# Altium footprint library Footprint-Lib-PhilsLab.PcbLib: 351 footprints (part 12 of 22)
Each footprint in its own frame and in the unit in brackets; x right, y up, seen from the top. Pads: shape width x height; smd on the part's side, far side on the other; paste and mask are expansions set on the pad; w line width, h text height; cw(c..) or ccw(c..) is an arc to the next point about the centre after c.
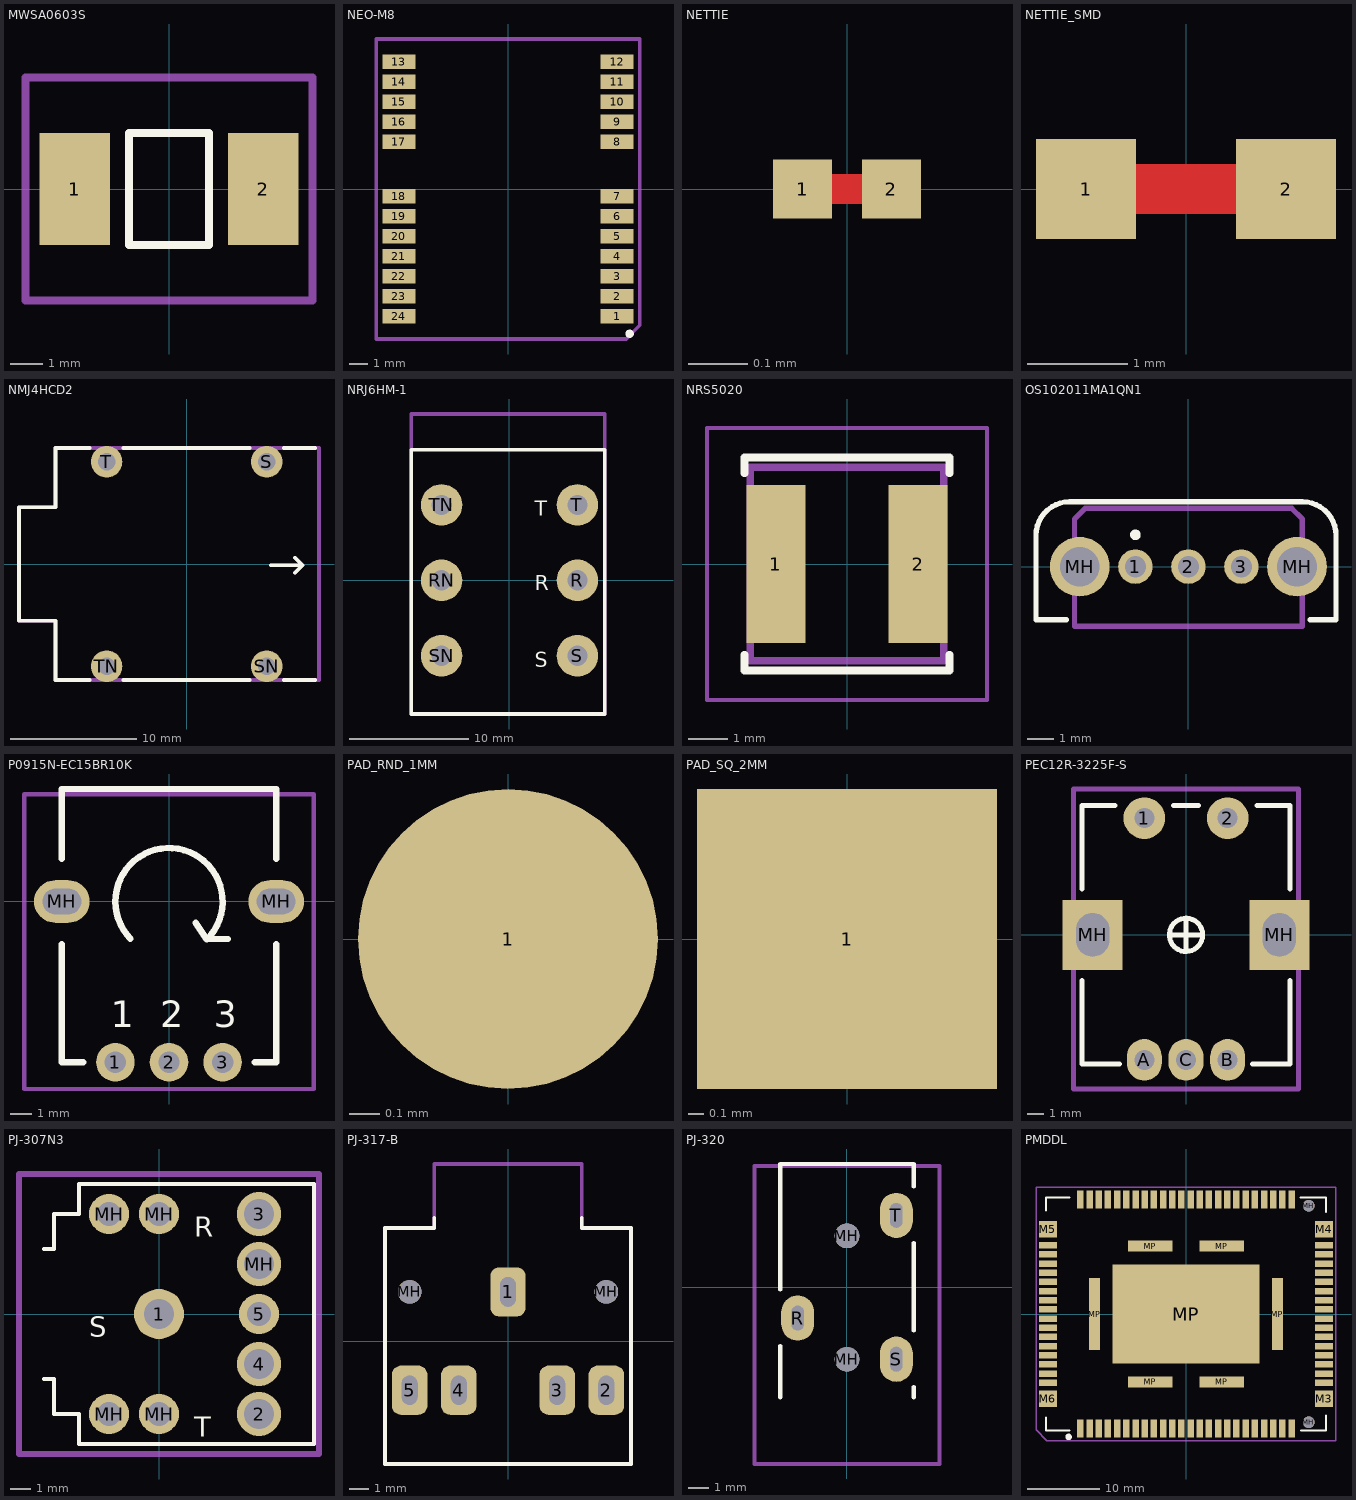
[diagram p11: the footprints below, top view; thin cyan lines are the x and y axes]

## MWSA0603S [mm]
pads (2):
  rect 2.2x3.5 smd: 1(-2.95,0) 2(2.95,0)
Top Overlay:
  lines w0.25: -1.25,-1.75 -1.25,1.75 1.25,1.75 1.25,-1.75 -1.25,-1.75
Mechanical 13:
  lines w0.25: -4.5,-3.5 4.5,-3.5 4.5,3.5 -4.5,3.5 -4.5,-3.5
  text "'.Designator'" at -5.815,-0.9 h1
3D body "MWSA0603S.STEP": height 2.8, standoff 0, extent -3.6,-3.3 3.6,3.3

## NEO-M8 [mm]
pads (24):
  rect 1.8x0.8 smd mask+0.07: 1(6,-7) 2(6,-5.9) 3(6,-4.8) 4(6,-3.7) 5(6,-2.6) 6(6,-1.5) 7(6,-0.4) 8(6,2.6) 9(6,3.7) 10(6,4.8) 11(6,5.9) 12(6,7) 13(-6,7) 14(-6,5.9) 15(-6,4.8) 16(-6,3.7) 17(-6,2.6) 18(-6,-0.4) 19(-6,-1.5) 20(-6,-2.6) 21(-6,-3.7) 22(-6,-4.8) 23(-6,-5.9) 24(-6,-7)
Top Overlay:
  circle w0.25: c6.693,-7.961 r0.105
Mechanical 13:
  lines w0.2: -7.25,-8.25 -7.25,-8 -7.25,8.25 7.25,8.25 7.25,-7.5 6.5,-8.25 -7.25,-8.25
  text "'.Designator'" at -5.84,-0.925 h1
3D body "NEO-M8.step": height 2.4, standoff 0, extent -6.1,-8 6.1,8

## NETTIE [mm]
pads (2):
  rect 0.1x0.1 smd paste-1 mask-1: 1(-0.075,0) 2(0.075,0)
Top Layer:
  rectangle: -0.048,-0.025 0.048,0.025

## NETTIE_SMD [mm]
pads (2):
  rect 1x1 smd mask-10: 1(-1,0) 2(1,0)
Top Layer:
  rectangle: -0.75,-0.25 0.75,0.25

## NMJ4HCD2 [mm]
pads (4):
  round 2.5 hole 1.4: S(6.35,8.115) SN(6.35,-8.115) T(-6.35,8.115) TN(-6.35,-8.115)
Top Overlay:
  lines w0.2: 9.2,-0.1 9.2,-0.1 ; 9.2,-0.1 9.2,-0.1
  lines w0.3: -7.7,-9.2 -10.4,-9.2 -10.4,-4.5 -13.3,-4.5 -13.3,4.5 -10.5,4.5 -10.4,4.5 -10.4,9.2 -7.7,9.2 ; -5,-9.2 5,-9.2 ; -5,9.2 5,9.2 ; 6.7,-0.1 9.2,-0.1 ; 7.7,-9.2 10.2,-9.2 ; 7.7,9.2 10.2,9.2 ; 8.6,-0.7 9.2,-0.1 ; 8.6,0.5 9.2,-0.1
Mechanical 13:
  lines w0.2: 9.2,-0.1 9.2,-0.1 ; 9.2,-0.1 9.2,-0.1
  lines w0.3: 6.7,-0.1 9.2,-0.1 ; 8.6,-0.7 9.2,-0.1 ; 8.6,0.5 9.2,-0.1 ; -13.3,-4.5 -13.3,4.5 -10.5,4.5 -10.4,4.5 -10.4,9.2 10.5,9.2 10.5,-9.2 -10.4,-9.2 -10.4,-4.5 -13.3,-4.5
  text "'.Designator'" at -5.665,-0.417 h1
3D body "NMJ4HCD20.stp": height 15.68, standoff -3.99, extent -13.18,-9.1 13.35,9.1

## NRJ6HM-1 [mm]
pads (6):
  round 3.5 hole 1.7: R(5.715,0) RN(-5.715,0) S(5.715,-6.35) SN(-5.715,-6.35) T(5.715,6.35) TN(-5.715,6.35)
Top Overlay:
  lines w0.3: -8.25,-11.25 -8.25,11 8,11 8,-11.25 -8.25,-11.25
  text "T" at 2.133,5.425 h1.25
  text "R" at 2.133,-0.825 h1.25
  text "S" at 2.133,-7.325 h1.25
Mechanical 13:
  lines w0.3: -8.25,-11.25 -8.25,14 8,14 8,-11.25 -8.25,-11.25
  text "'.Designator'" at -5.815,-0.9 h1
3D body "NRJ6HM-1.stp": height 12.71, standoff -3.99, extent -7.945,-19.3 7.805,13.7

## NRS5020 [mm]
pads (2):
  rect 1.5x4 smd: 1(-1.8,0) 2(1.8,0)
Top Overlay:
  lines w0.2: -2.6,-2.3 -2.6,-2.7 2.6,-2.7 2.6,-2.3 ; -2.6,2.3 -2.6,2.7 2.6,2.7 2.6,2.3
Mechanical 13:
  lines w0.2: -2.45,-2.45 2.45,-2.45 2.45,2.45 -2.45,2.45 -2.45,-2.45
  text "'.Designator'" at -5.815,-0.9 h1
Mechanical 15:
  lines w0.1: -3.55,-3.45 3.55,-3.45 3.55,3.45 -3.55,3.45 -3.55,-3.45
3D body "NRS5020T4R7MMGJ.stp": height 2.1, standoff 0, extent -2.45,-2.45 2.45,2.45

## OS102011MA1QN1 [mm]
pads (5):
  round 1.3 hole 0.8: 1(-2,0) 2(0,0) 3(2,0)
  round 2.25 hole 1.5: MH(-4.1,0) MH(4.1,0)
Top Overlay:
  circle w0.2: c-2,1.2 r0.099
  lines w0.2: -4.6,-2 -5.75,-2 -5.75,0 -5.75,1.18 cw(c-4.48,1.18) -4.48,2.45 -4.3,2.45 4.3,2.45 cw(c4.3,1.18) 5.57,1.18 5.57,0 5.57,-2 4.6,-2
Mechanical 13:
  lines w0.2: -4.3,-2.25 4.3,-2.25 4.3,1.8 3.9,2.2 -3.9,2.2 -4.3,1.8 -4.3,-2.25
  text "'.Designator'" at -6.315,-1.4 h1
3D body "OS102011MA1QN1.stp": height 4.59, standoff -3.01, extent -4.301,-6.215 4.299,2.185

## P0915N-EC15BR10K [mm]
pads (5):
  round 1.8 hole 1: 1(-2.5,-7.5) 2(0,-7.5) 3(2.5,-7.5)
  oval 2.6x2 hole 1.2 slot 1.8 at 0 deg: MH(-5,0) MH(5,0)
Top Overlay:
  lines w0.3: -5,-2 -5,-7.5 -4,-7.5 ; -5,2 -5,5.25 5,5.25 5,2 ; -1.798,-1.737 cw(c0,0) 1.768,-1.768 ; 1.25,-1 1.768,-1.768 ; 2.75,-1.75 1.768,-1.768 ; 4,-7.5 5,-7.5 5,-2
  text "1" at -2.708,-5.875 h1.25
  text "2" at -0.417,-5.875 h1.25
  text "3" at 2.083,-5.875 h1.25
Mechanical 13:
  lines w0.2: -6.75,-8.75 -6.75,5 6.75,5 6.75,-8.75 -6.75,-8.75
  text "1" at -2.708,-5.875 h1.25
  text "2" at -0.417,-5.875 h1.25
  text "3" at 2.083,-5.875 h1.25
  text "'.Designator'" at -5.815,-0.9 h1
3D body "P0915N-EC15BR10K.stp": height 25.01, standoff -3.29, extent -6.049,-7.65 6.049,4.85

## PAD_RND_1MM [mm]
pads (1):
  round 1 smd paste-0.5 mask+0: 1(0,0)

## PAD_SQ_2MM [mm]
pads (1):
  rect 2x2 smd paste-1: 1(0,0)

## PEC12R-3225F-S [mm]
pads (7):
  round 2.5 hole 1.2: 1(-2.5,7) 2(2.5,7)
  oval 2.1x2.5 hole 1.2: A(-2.5,-7.5) B(2.5,-7.5) C(0,-7.5)
  rect 3.6x4.2 hole 2 slot 2.6 at 90 deg: MH(-5.6,0) MH(5.6,0)
Top Overlay:
  circle w0.3: c0,0 r1
  lines w0.3: -6.25,-2.75 -6.25,-7.75 -4,-7.75 ; -6.25,2.75 -6.25,7.75 -4.25,7.75 ; -1,0 1,0 ; -0.75,7.75 0.75,7.75 ; 0,-1 0,1 ; 4,-7.75 6.25,-7.75 6.25,-2.75 ; 4.25,7.75 6.25,7.75 6.25,2.75
Mechanical 13:
  lines w0.3: -6.75,-9.25 -6.75,8.75 6.75,8.75 6.75,-9.25 -6.75,-9.25
  text "'.Designator'" at -5.665,-0.417 h1
3D body "PEC12R-3225F-S.step": height 25.01, standoff -3.49, extent -5.75,-7.25 5.75,7.25

## PJ-307N3 [mm]
pads (10):
  round 2.5 hole 1.5: 1(0,0)
  round 2.2 hole 1.5: 2(5,-5) 3(5,5) 4(5,-2.5) MH(5,2.5)
  round 2 hole 1.2: 5(5,0) MH(-2.5,-5) MH(-2.5,5) MH(0,-5) MH(0,5)
Top Overlay:
  lines w0.2: -5.75,-3.25 -5.25,-3.25 -5.25,-5 -4,-5 -4,-6.5 7.75,-6.5 7.75,-5.75 7.75,6.5 -4,6.5 -4,5 -5.25,5 -5.25,3.25 -5.75,3.25
  text "S" at -3.483,-1.15 h1
  text "T" at 1.767,-6.15 h1
  text "R" at 1.767,3.85 h1
Mechanical 13:
  lines w0.3: -7,-7 8,-7 8,7 -7,7 -7,-7
  text "'.Designator'" at -6.315,-1.4 h1
3D body "pj-307n3.stp": height 5.51, standoff -3.49, extent -6.6,-6 7.4,6

## PJ-317-B [mm]
pads (7):
  rrect50% 1.8x2.5 hole 0.8 slot 1.5 at 90 deg mask+0.07: 1(0,2.5) 2(5,-2.5) 3(2.5,-2.5) 4(-2.5,-2.5) 5(-5,-2.5)
  round 1.2 hole 1.2 unplated mask+0.07: MH(-5,2.5) MH(5,2.5)
Top Overlay:
  lines w0.2: -3.75,6.25 -3.75,5.75 -6.25,5.75 -6.25,-6.25 6.25,-6.25 6.25,5.75 3.75,5.75 3.75,6.25
Mechanical 13:
  lines w0.2: -6.25,-6.25 6.25,-6.25 6.25,5.75 3.75,5.75 3.75,9 -3.75,9 -3.75,5.75 -6.25,5.75 -6.25,-6.25
  text "'.Designator'" at -7.231,-1.087 h1.25
3D body "pj-317-b.stp": height 10.01, standoff -3.99, extent -6,-6.1 6,9

## PJ-320 [mm]
pads (5):
  round 1.2 hole 1.2 unplated: MH(0,-3.5) MH(0,2.5)
  oval 1.6x2.2 hole 0.6 slot 1.2 at 90 deg: R(-2.4,-1.5) S(2.4,-3.5) T(2.4,3.5)
Top Overlay:
  lines w0.2: -3.25,-5.35 -3.25,-2.85 ; -3.25,-0.1 -3.25,6 3.25,6 3.25,4.9 ; 3.25,-5.35 3.25,-4.85 ; 3.25,-2.1 3.25,2.15
Mechanical 13:
  lines w0.2: -4.5,-8.6 4.5,-8.6 4.5,5.9 -4.5,5.9 -4.5,-8.6
  text ".Designator" at -4.998,-0.333 h1
3D body "pj-320b.stp": height 5.01, standoff -0.49, extent -4.25,-8.3 4.25,5.7

## PMDDL [mm]
pads (93):
  rect 0.9x2.5 smd: 1(-14.605,-15.85) 2(-13.335,-15.85) 3(-12.065,-15.85) 4(-10.795,-15.85) 5(-9.525,-15.85) 6(-8.255,-15.85) 7(-6.985,-15.85) 8(-5.715,-15.85) 9(-4.445,-15.85) 10(-3.175,-15.85) 11(-1.905,-15.85) 12(-0.635,-15.85) 13(0.635,-15.85) 14(1.905,-15.85) 15(3.175,-15.85) 16(4.445,-15.85) 17(5.715,-15.85) 18(6.985,-15.85) 19(8.255,-15.85) 20(9.525,-15.85) 21(10.795,-15.85) 22(12.065,-15.85) 23(13.335,-15.85) 24(14.605,-15.85) 41(14.605,15.85) 42(13.335,15.85) 43(12.065,15.85) 44(10.795,15.85) 45(9.525,15.85) 46(8.255,15.85) 47(6.985,15.85) 48(5.715,15.85) 49(4.445,15.85) 50(3.175,15.85) 51(1.905,15.85) 52(0.635,15.85) 53(-0.635,15.85) 54(-1.905,15.85) 55(-3.175,15.85) 56(-4.445,15.85) 57(-5.715,15.85) 58(-6.985,15.85) 59(-8.255,15.85) 60(-9.525,15.85) 61(-10.795,15.85) 62(-12.065,15.85) 63(-13.335,15.85) 64(-14.605,15.85)
  rect 2.5x0.9 smd: 25(19.1,-9.525) 26(19.1,-8.255) 27(19.1,-6.985) 28(19.1,-5.715) 29(19.1,-4.445) 30(19.1,-3.175) 31(19.1,-1.905) 32(19.1,-0.635) 33(19.1,0.635) 34(19.1,1.905) 35(19.1,3.175) 36(19.1,4.445) 37(19.1,5.715) 38(19.1,6.985) 39(19.1,8.255) 40(19.1,9.525) 65(-19.1,9.525) 66(-19.1,8.255) 67(-19.1,6.985) 68(-19.1,5.715) 69(-19.1,4.445) 70(-19.1,3.175) 71(-19.1,1.905) 72(-19.1,0.635) 73(-19.1,-0.635) 74(-19.1,-1.905) 75(-19.1,-3.175) 76(-19.1,-4.445) 77(-19.1,-5.715) 78(-19.1,-6.985) 79(-19.1,-8.255) 80(-19.1,-9.525)
  rect 2.5x2.3 smd: M3(19.1,-11.7) M4(19.1,11.7) M5(-19.1,11.7) M6(-19.1,-11.7)
  round 1.6 / inner round 1.4 / far side round 1.6 hole 1.6 unplated: MH(16.97,-14.985) MH(16.97,14.985)
  rect 1.5x10 smd: MP(-12.65,0) MP(12.65,0)
  rect 6.15x1.5 smd: MP(-4.975,-9.4) MP(-4.975,9.4) MP(4.975,-9.4) MP(4.975,9.4)
  rect 20.32x13.716 smd: MP(0,0)
Top Overlay:
  circle w0.5: c-16.25,-17 r0.2
  lines w0.25: -19.35,-14.31 -19.35,-16.1 -16.125,-16.1 ; -19.35,14.326 -19.35,16.1 -16.125,16.1 ; 15.805,16.1 19.355,16.1 19.355,14.07 ; 15.89,-16.1 19.35,-16.1 19.35,-14.045
Mechanical 13:
  lines w0.2: -20.75,-16 -20.75,17.5 20.75,17.5 20.75,-17.5 -19.25,-17.5 -20.75,-16
  text "'.Designator'" at -5.665,-0.417 h1
3D body "pDDL-Microhard.step": height 5.94, standoff 2.34, extent -16.406,-13.385 16.614,13.285
3D body "socket.stp": height 6.02, standoff -1.1, extent -19.456,-16.341 19.644,16.239